# Altium footprint library TACTILE_SWITCH_SMD_6.0X3.5MM.PcbLib: 1 footprints
Each footprint in its own frame and in the unit in brackets; x right, y up, seen from the top. Pads: shape width x height; smd on the part's side, far side on the other; paste and mask are expansions set on the pad; w line width, h text height; cw(c..) or ccw(c..) is an arc to the next point about the centre after c.
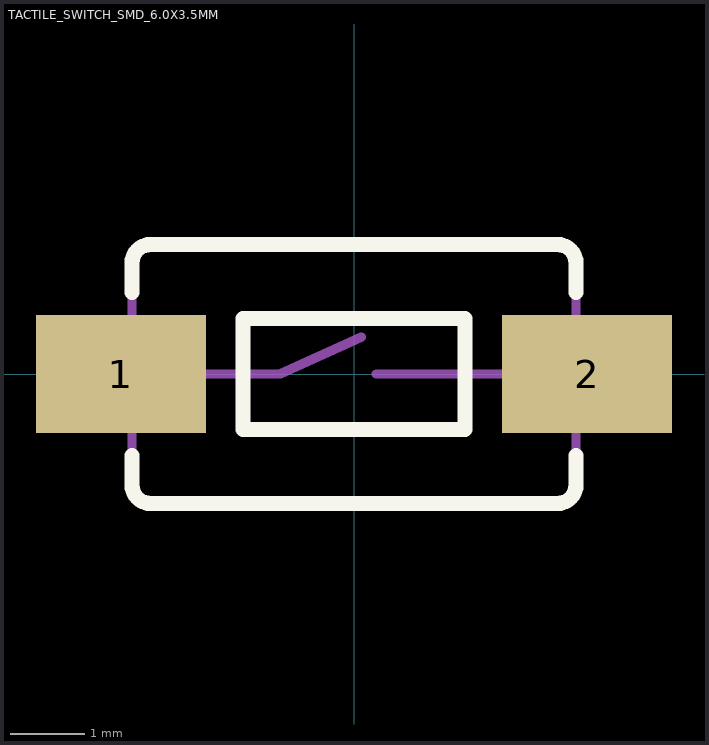
[diagram p0: the footprint, top view; thin cyan lines are the x and y axes]

## TACTILE_SWITCH_SMD_6.0X3.5MM [mm]
pads (2):
  rect 2.3x1.6 smd: 1(-3.15,0) 2(3.15,0)
Top Overlay:
  lines w0.203: -3,-1.1 -3,-1.5 ccw(c-2.75,-1.5) -2.75,-1.75 2.75,-1.75 ccw(c2.75,-1.5) 3,-1.5 3,-1.1 ; -3,1.1 -3,1.5 cw(c-2.75,1.5) -2.75,1.75 2.75,1.75 cw(c2.75,1.5) 3,1.5 3,1.1 ; -1.5,-0.75 1.5,-0.75 1.5,0.75 -1.5,0.75 -1.5,-0.75
Assembly Top:
  lines w0.127: -3,-1.1 -3,1.1 ; -2,0 -1,0 0.1,0.5 ; 0.3,0 2,0 ; 3,-1.1 3,1.1